# Altium footprint library WR-FPC_0.50mm.PcbLib: 147 footprints (part 8 of 10)
Each footprint in its own frame and in the unit in brackets; x right, y up, seen from the top. Pads: shape width x height; smd on the part's side, far side on the other; paste and mask are expansions set on the pad; w line width, h text height; cw(c..) or ccw(c..) is an arc to the next point about the centre after c.
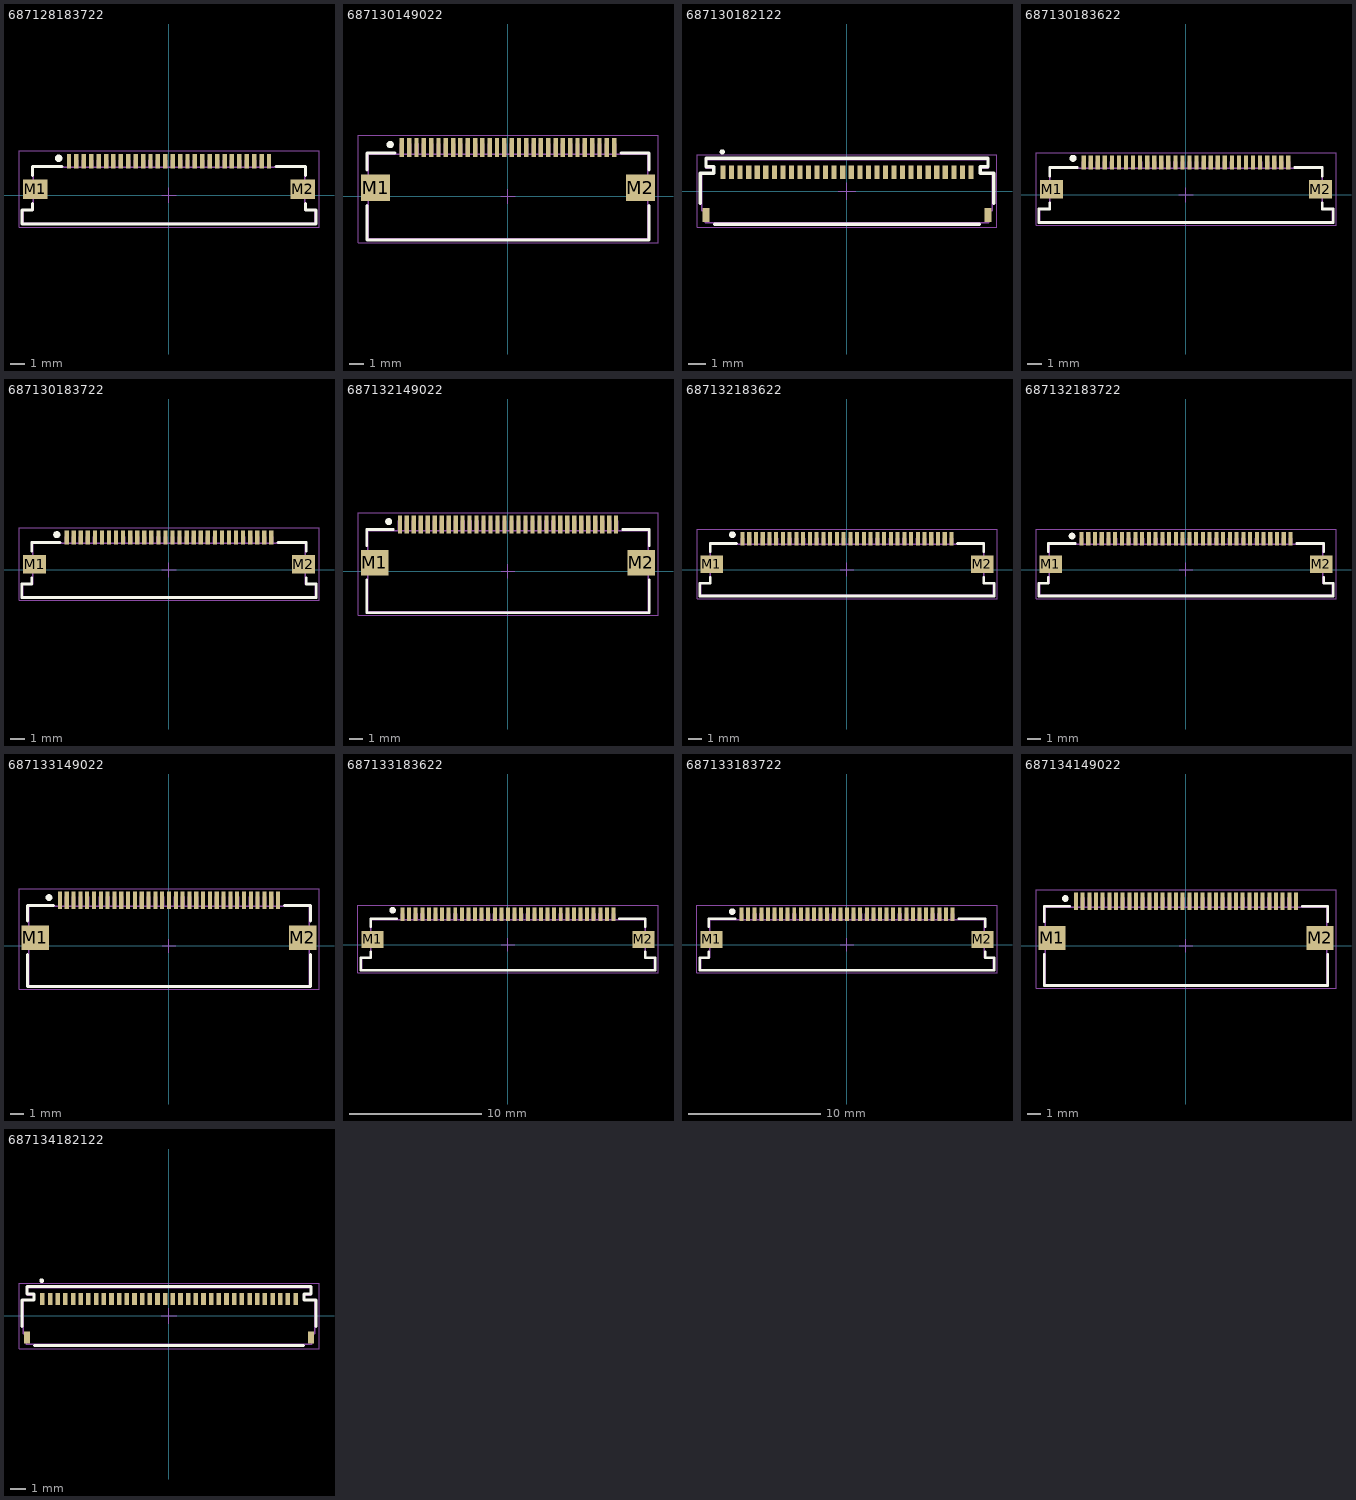
[diagram p7: the footprints below, top view; thin cyan lines are the x and y axes]

## 687128183722 [mm] "ZIF Connectors, Horizontal, Bottom Contact Low Profile, pitch 0.5mm, 28p"
height 1.3
pads (30):
  rect 0.3x1 smd: 1(-6.75,2.3) 2(-6.25,2.3) 3(-5.75,2.3) 4(-5.25,2.3) 5(-4.75,2.3) 6(-4.25,2.3) 7(-3.75,2.3) 8(-3.25,2.3) 9(-2.75,2.3) 10(-2.25,2.3) 11(-1.75,2.3) 12(-1.25,2.3) 13(-0.75,2.3) 14(-0.25,2.3) 15(0.25,2.3) 16(0.75,2.3) 17(1.25,2.3) 18(1.75,2.3) 19(2.25,2.3) 20(2.75,2.3) 21(3.25,2.3) 22(3.75,2.3) 23(4.25,2.3) 24(4.75,2.3) 25(5.25,2.3) 26(5.75,2.3) 27(6.25,2.3) 28(6.75,2.3)
  rect 1.65x1.3 smd: M1(-9.025,0.4) M2(9.025,0.4)
Top Overlay:
  circle w0.25: c-7.45,2.5 r0.125
  lines w0.2: -9.225,-0.55 -9.225,-1 -9.925,-1 -9.925,-1.95 9.925,-1.95 9.925,-1 9.225,-1 9.225,-0.55 ; -9.225,1.35 -9.225,1.95 -7.225,1.95 ; 7.225,1.95 9.225,1.95 9.225,1.35
Top Designator:
  text ".Designator" at -7.498,-0.5 h1.5
Top Component Outline:
  lines w0.1: -6.85,1.9 -6.85,2.35 -6.65,2.35 -6.65,1.9 ; -6.35,1.9 -6.35,2.35 -6.15,2.35 -6.15,1.9 ; -5.85,1.9 -5.85,2.35 -5.65,2.35 -5.65,1.9 ; -5.35,1.9 -5.35,2.35 -5.15,2.35 -5.15,1.9 ; -4.85,1.9 -4.85,2.35 -4.65,2.35 -4.65,1.9 ; -4.35,1.9 -4.35,2.35 -4.15,2.35 -4.15,1.9 ; -3.85,1.9 -3.85,2.35 -3.65,2.35 -3.65,1.9 ; -3.35,1.9 -3.35,2.35 -3.15,2.35 -3.15,1.9 ; -2.85,1.9 -2.85,2.35 -2.65,2.35 -2.65,1.9 ; -2.35,1.9 -2.35,2.35 -2.15,2.35 -2.15,1.9 ; -1.85,1.9 -1.85,2.35 -1.65,2.35 -1.65,1.9 ; -1.35,1.9 -1.35,2.35 -1.15,2.35 -1.15,1.9 ; -0.85,1.9 -0.85,2.35 -0.65,2.35 -0.65,1.9 ; -0.35,1.9 -0.35,2.35 -0.15,2.35 -0.15,1.9 ; 0.15,1.9 0.15,2.35 0.35,2.35 0.35,1.9 ; 0.65,1.9 0.65,2.35 0.85,2.35 0.85,1.9 ; 1.15,1.9 1.15,2.35 1.35,2.35 1.35,1.9 ; 1.65,1.9 1.65,2.35 1.85,2.35 1.85,1.9 ; 2.15,1.9 2.15,2.35 2.35,2.35 2.35,1.9 ; 2.65,1.9 2.65,2.35 2.85,2.35 2.85,1.9 ; 3.15,1.9 3.15,2.35 3.35,2.35 3.35,1.9 ; 3.65,1.9 3.65,2.35 3.85,2.35 3.85,1.9 ; 4.15,1.9 4.15,2.35 4.35,2.35 4.35,1.9 ; 4.65,1.9 4.65,2.35 4.85,2.35 4.85,1.9 ; 5.15,1.9 5.15,2.35 5.35,2.35 5.35,1.9 ; 5.65,1.9 5.65,2.35 5.85,2.35 5.85,1.9 ; 6.15,1.9 6.15,2.35 6.35,2.35 6.35,1.9 ; 6.65,1.9 6.65,2.35 6.85,2.35 6.85,1.9 ; -9.85,-1.9 9.85,-1.9 9.85,-1 9.15,-1 9.15,1.9 -9.15,1.9 -9.15,-1 -9.85,-1 -9.85,-1.9
Top 3D Body:
  lines w0.1: -6.85,1.9 -6.85,2.35 -6.65,2.35 -6.65,1.9 ; -6.35,1.9 -6.35,2.35 -6.15,2.35 -6.15,1.9 ; -5.85,1.9 -5.85,2.35 -5.65,2.35 -5.65,1.9 ; -5.35,1.9 -5.35,2.35 -5.15,2.35 -5.15,1.9 ; -4.85,1.9 -4.85,2.35 -4.65,2.35 -4.65,1.9 ; -4.35,1.9 -4.35,2.35 -4.15,2.35 -4.15,1.9 ; -3.85,1.9 -3.85,2.35 -3.65,2.35 -3.65,1.9 ; -3.35,1.9 -3.35,2.35 -3.15,2.35 -3.15,1.9 ; -2.85,1.9 -2.85,2.35 -2.65,2.35 -2.65,1.9 ; -2.35,1.9 -2.35,2.35 -2.15,2.35 -2.15,1.9 ; -1.85,1.9 -1.85,2.35 -1.65,2.35 -1.65,1.9 ; -1.35,1.9 -1.35,2.35 -1.15,2.35 -1.15,1.9 ; -0.85,1.9 -0.85,2.35 -0.65,2.35 -0.65,1.9 ; -0.35,1.9 -0.35,2.35 -0.15,2.35 -0.15,1.9 ; 0.15,1.9 0.15,2.35 0.35,2.35 0.35,1.9 ; 0.65,1.9 0.65,2.35 0.85,2.35 0.85,1.9 ; 1.15,1.9 1.15,2.35 1.35,2.35 1.35,1.9 ; 1.65,1.9 1.65,2.35 1.85,2.35 1.85,1.9 ; 2.15,1.9 2.15,2.35 2.35,2.35 2.35,1.9 ; 2.65,1.9 2.65,2.35 2.85,2.35 2.85,1.9 ; 3.15,1.9 3.15,2.35 3.35,2.35 3.35,1.9 ; 3.65,1.9 3.65,2.35 3.85,2.35 3.85,1.9 ; 4.15,1.9 4.15,2.35 4.35,2.35 4.35,1.9 ; 4.65,1.9 4.65,2.35 4.85,2.35 4.85,1.9 ; 5.15,1.9 5.15,2.35 5.35,2.35 5.35,1.9 ; 5.65,1.9 5.65,2.35 5.85,2.35 5.85,1.9 ; 6.15,1.9 6.15,2.35 6.35,2.35 6.35,1.9 ; 6.65,1.9 6.65,2.35 6.85,2.35 6.85,1.9 ; -9.85,-1.9 -9.85,-1 -9.15,-1 -9.15,1.9 9.15,1.9 9.15,-1 9.85,-1 9.85,-1.9 -9.85,-1.9
Top Courtyard:
  lines w0.05: -0.5,0 0.5,0 ; 0,-0.5 0,0.5 ; -10.125,-2.15 10.125,-2.15 10.125,3 -10.125,3 -10.125,-2.15
3D body "687128183722.stp": height 1.28, standoff -0.01, extent -9.85,-1.9 9.85,2.35

## 687130149022 [mm] "0.50mm SMT ZIF Horizontal Hinge Type Bottom Contact, 30p"
height 2.3
pads (32):
  rect 0.3x1.3 smd: 1(-7.25,3.35) 2(-6.75,3.35) 3(-6.25,3.35) 4(-5.75,3.35) 5(-5.25,3.35) 6(-4.75,3.35) 7(-4.25,3.35) 8(-3.75,3.35) 9(-3.25,3.35) 10(-2.75,3.35) 11(-2.25,3.35) 12(-1.75,3.35) 13(-1.25,3.35) 14(-0.75,3.35) 15(-0.25,3.35) 16(0.25,3.35) 17(0.75,3.35) 18(1.25,3.35) 19(1.75,3.35) 20(2.25,3.35) 21(2.75,3.35) 22(3.25,3.35) 23(3.75,3.35) 24(4.25,3.35) 25(4.75,3.35) 26(5.25,3.35) 27(5.75,3.35) 28(6.25,3.35) 29(6.75,3.35) 30(7.25,3.35)
  rect 2x1.8 smd: M1(-9.05,0.6) M2(9.05,0.6)
Top Overlay:
  circle w0.25: c-8.05,3.55 r0.125
  lines w0.2: -9.625,-0.625 -9.625,-2.975 9.625,-2.975 9.625,-0.625 ; -9.625,1.825 -9.625,2.975 -7.725,2.975 ; 7.725,2.975 9.625,2.975 9.625,1.825
Top Designator:
  text ".Designator" at -7.498,-0.5 h1.5
Top Component Outline:
  lines w0.1: -7.35,2.9 -7.35,3.6 -7.15,3.6 -7.15,2.9 ; -6.85,2.9 -6.85,3.6 -6.65,3.6 -6.65,2.9 ; -6.35,2.9 -6.35,3.6 -6.15,3.6 -6.15,2.9 ; -5.85,2.9 -5.85,3.6 -5.65,3.6 -5.65,2.9 ; -5.35,2.9 -5.35,3.6 -5.15,3.6 -5.15,2.9 ; -4.85,2.9 -4.85,3.6 -4.65,3.6 -4.65,2.9 ; -4.35,2.9 -4.35,3.6 -4.15,3.6 -4.15,2.9 ; -3.85,2.9 -3.85,3.6 -3.65,3.6 -3.65,2.9 ; -3.35,2.9 -3.35,3.6 -3.15,3.6 -3.15,2.9 ; -2.85,2.9 -2.85,3.6 -2.65,3.6 -2.65,2.9 ; -2.35,2.9 -2.35,3.6 -2.15,3.6 -2.15,2.9 ; -1.85,2.9 -1.85,3.6 -1.65,3.6 -1.65,2.9 ; -1.35,2.9 -1.35,3.6 -1.15,3.6 -1.15,2.9 ; -0.85,2.9 -0.85,3.6 -0.65,3.6 -0.65,2.9 ; -0.35,2.9 -0.35,3.6 -0.15,3.6 -0.15,2.9 ; 0.15,2.9 0.15,3.6 0.35,3.6 0.35,2.9 ; 0.65,2.9 0.65,3.6 0.85,3.6 0.85,2.9 ; 1.15,2.9 1.15,3.6 1.35,3.6 1.35,2.9 ; 1.65,2.9 1.65,3.6 1.85,3.6 1.85,2.9 ; 2.15,2.9 2.15,3.6 2.35,3.6 2.35,2.9 ; 2.65,2.9 2.65,3.6 2.85,3.6 2.85,2.9 ; 3.15,2.9 3.15,3.6 3.35,3.6 3.35,2.9 ; 3.65,2.9 3.65,3.6 3.85,3.6 3.85,2.9 ; 4.15,2.9 4.15,3.6 4.35,3.6 4.35,2.9 ; 4.65,2.9 4.65,3.6 4.85,3.6 4.85,2.9 ; 5.15,2.9 5.15,3.6 5.35,3.6 5.35,2.9 ; 5.65,2.9 5.65,3.6 5.85,3.6 5.85,2.9 ; 6.15,2.9 6.15,3.6 6.35,3.6 6.35,2.9 ; 6.65,2.9 6.65,3.6 6.85,3.6 6.85,2.9 ; 7.15,2.9 7.15,3.6 7.35,3.6 7.35,2.9 ; -9.55,-2.9 -9.55,2.9 9.55,2.9 9.55,-2.9 -9.55,-2.9
Top 3D Body:
  lines w0.1: -7.35,2.9 -7.35,3.6 -7.15,3.6 -7.15,2.9 ; -6.85,2.9 -6.85,3.6 -6.65,3.6 -6.65,2.9 ; -6.35,2.9 -6.35,3.6 -6.15,3.6 -6.15,2.9 ; -5.85,2.9 -5.85,3.6 -5.65,3.6 -5.65,2.9 ; -5.35,2.9 -5.35,3.6 -5.15,3.6 -5.15,2.9 ; -4.85,2.9 -4.85,3.6 -4.65,3.6 -4.65,2.9 ; -4.35,2.9 -4.35,3.6 -4.15,3.6 -4.15,2.9 ; -3.85,2.9 -3.85,3.6 -3.65,3.6 -3.65,2.9 ; -3.35,2.9 -3.35,3.6 -3.15,3.6 -3.15,2.9 ; -2.85,2.9 -2.85,3.6 -2.65,3.6 -2.65,2.9 ; -2.35,2.9 -2.35,3.6 -2.15,3.6 -2.15,2.9 ; -1.85,2.9 -1.85,3.6 -1.65,3.6 -1.65,2.9 ; -1.35,2.9 -1.35,3.6 -1.15,3.6 -1.15,2.9 ; -0.85,2.9 -0.85,3.6 -0.65,3.6 -0.65,2.9 ; -0.35,2.9 -0.35,3.6 -0.15,3.6 -0.15,2.9 ; 0.15,2.9 0.15,3.6 0.35,3.6 0.35,2.9 ; 0.65,2.9 0.65,3.6 0.85,3.6 0.85,2.9 ; 1.15,2.9 1.15,3.6 1.35,3.6 1.35,2.9 ; 1.65,2.9 1.65,3.6 1.85,3.6 1.85,2.9 ; 2.15,2.9 2.15,3.6 2.35,3.6 2.35,2.9 ; 2.65,2.9 2.65,3.6 2.85,3.6 2.85,2.9 ; 3.15,2.9 3.15,3.6 3.35,3.6 3.35,2.9 ; 3.65,2.9 3.65,3.6 3.85,3.6 3.85,2.9 ; 4.15,2.9 4.15,3.6 4.35,3.6 4.35,2.9 ; 4.65,2.9 4.65,3.6 4.85,3.6 4.85,2.9 ; 5.15,2.9 5.15,3.6 5.35,3.6 5.35,2.9 ; 5.65,2.9 5.65,3.6 5.85,3.6 5.85,2.9 ; 6.15,2.9 6.15,3.6 6.35,3.6 6.35,2.9 ; 6.65,2.9 6.65,3.6 6.85,3.6 6.85,2.9 ; 7.15,2.9 7.15,3.6 7.35,3.6 7.35,2.9 ; -9.55,-2.9 9.55,-2.9 9.55,2.9 -9.55,2.9 -9.55,-2.9
Top Courtyard:
  lines w0.05: -0.5,0 0.5,0 ; 0,-0.5 0,0.5 ; -10.25,-3.175 -10.25,4.2 10.25,4.2 10.25,-3.175 -10.25,-3.175
3D body "687130149022.stp": height 2.25, standoff 0, extent -9.55,-2.9 9.55,3.6

## 687130182122 [mm] "ZIF Connectors, Horizontal, Dual Contact Back Locking, pitch 0.5mm, 30p"
height 1.06
pads (32):
  rect 0.3x0.8 smd: 1(-7.25,1.1) 2(-6.75,1.1) 3(-6.25,1.1) 4(-5.75,1.1) 5(-5.25,1.1) 6(-4.75,1.1) 7(-4.25,1.1) 8(-3.75,1.1) 9(-3.25,1.1) 10(-2.75,1.1) 11(-2.25,1.1) 12(-1.75,1.1) 13(-1.25,1.1) 14(-0.75,1.1) 15(-0.25,1.1) 16(0.25,1.1) 17(0.75,1.1) 18(1.25,1.1) 19(1.75,1.1) 20(2.25,1.1) 21(2.75,1.1) 22(3.25,1.1) 23(3.75,1.1) 24(4.25,1.1) 25(4.75,1.1) 26(5.25,1.1) 27(5.75,1.1) 28(6.25,1.1) 29(6.75,1.1) 30(7.25,1.1)
  rect 0.4x0.8 smd: M1(-8.25,-1.4) M2(8.25,-1.4)
Top Overlay:
  circle w0.15: c-7.3,2.3 r0.075
  lines w0.2: -8.575,-0.7 -8.575,1.05 -7.8,1.05 -7.8,1.425 -8.25,1.425 -8.25,1.925 8.25,1.925 8.25,1.425 7.8,1.425 7.8,1.05 8.575,1.05 8.575,-0.7 ; -7.75,-1.925 7.75,-1.925
Top Designator:
  text ".Designator" at -7.498,-0.5 h1.5
Top Component Outline:
  lines w0.1: -8.5,-1.15 -8.5,1.05 -7.8,1.05 -7.8,1.35 -8.25,1.35 -8.25,1.85 8.25,1.85 8.25,1.35 7.8,1.35 7.8,1.05 8.5,1.05 8.5,-1.15 8.3,-1.15 8.3,-1.85 -8.3,-1.85 -8.3,-1.15 -8.5,-1.15
Top 3D Body:
  lines w0.1: -8.5,-1.15 -8.3,-1.15 -8.3,-1.85 8.3,-1.85 8.3,-1.15 8.5,-1.15 8.5,1.05 7.8,1.05 7.8,1.35 8.25,1.35 8.25,1.85 -8.25,1.85 -8.25,1.35 -7.8,1.35 -7.8,1.05 -8.5,1.05 -8.5,-1.15
Top Courtyard:
  lines w0.05: -0.5,0 0.5,0 ; 0,-0.5 0,0.5 ; -8.775,-2.125 -8.775,2.125 8.775,2.125 8.775,-2.125 -8.775,-2.125
3D body "687130182122.stp": height 0.98, standoff -0.01, extent -8.5,-1.85 8.5,1.85

## 687130183622 [mm] "ZIF Connectors, Horizontal, Top Contact Low Profile, pitch 0.5mm, 30p"
height 1.3
pads (32):
  rect 0.3x1 smd: 1(-7.25,2.3) 2(-6.75,2.3) 3(-6.25,2.3) 4(-5.75,2.3) 5(-5.25,2.3) 6(-4.75,2.3) 7(-4.25,2.3) 8(-3.75,2.3) 9(-3.25,2.3) 10(-2.75,2.3) 11(-2.25,2.3) 12(-1.75,2.3) 13(-1.25,2.3) 14(-0.75,2.3) 15(-0.25,2.3) 16(0.25,2.3) 17(0.75,2.3) 18(1.25,2.3) 19(1.75,2.3) 20(2.25,2.3) 21(2.75,2.3) 22(3.25,2.3) 23(3.75,2.3) 24(4.25,2.3) 25(4.75,2.3) 26(5.25,2.3) 27(5.75,2.3) 28(6.25,2.3) 29(6.75,2.3) 30(7.25,2.3)
  rect 1.65x1.3 smd: M1(-9.525,0.4) M2(9.525,0.4)
Top Overlay:
  circle w0.25: c-8,2.6 r0.125
  lines w0.2: -9.65,-0.55 -9.65,-1 -10.425,-1 -10.425,-1.95 10.425,-1.95 10.425,-1 9.65,-1 9.65,-0.55 ; -9.65,1.35 -9.65,1.95 -7.7,1.95 ; 7.7,1.95 9.65,1.95 9.65,1.35
Top Designator:
  text ".Designator" at -7.498,-0.5 h1.5
Top Component Outline:
  lines w0.1: -7.35,1.9 -7.35,2.35 -7.15,2.35 -7.15,1.9 ; -6.85,1.9 -6.85,2.35 -6.65,2.35 -6.65,1.9 ; -6.35,1.9 -6.35,2.35 -6.15,2.35 -6.15,1.9 ; -5.85,1.9 -5.85,2.35 -5.65,2.35 -5.65,1.9 ; -5.35,1.9 -5.35,2.35 -5.15,2.35 -5.15,1.9 ; -4.85,1.9 -4.85,2.35 -4.65,2.35 -4.65,1.9 ; -4.35,1.9 -4.35,2.35 -4.15,2.35 -4.15,1.9 ; -3.85,1.9 -3.85,2.35 -3.65,2.35 -3.65,1.9 ; -3.35,1.9 -3.35,2.35 -3.15,2.35 -3.15,1.9 ; -2.85,1.9 -2.85,2.35 -2.65,2.35 -2.65,1.9 ; -2.35,1.9 -2.35,2.35 -2.15,2.35 -2.15,1.9 ; -1.85,1.9 -1.85,2.35 -1.65,2.35 -1.65,1.9 ; -1.35,1.9 -1.35,2.35 -1.15,2.35 -1.15,1.9 ; -0.85,1.9 -0.85,2.35 -0.65,2.35 -0.65,1.9 ; -0.35,1.9 -0.35,2.35 -0.15,2.35 -0.15,1.9 ; 0.15,1.9 0.15,2.35 0.35,2.35 0.35,1.9 ; 0.65,1.9 0.65,2.35 0.85,2.35 0.85,1.9 ; 1.15,1.9 1.15,2.35 1.35,2.35 1.35,1.9 ; 1.65,1.9 1.65,2.35 1.85,2.35 1.85,1.9 ; 2.15,1.9 2.15,2.35 2.35,2.35 2.35,1.9 ; 2.65,1.9 2.65,2.35 2.85,2.35 2.85,1.9 ; 3.15,1.9 3.15,2.35 3.35,2.35 3.35,1.9 ; 3.65,1.9 3.65,2.35 3.85,2.35 3.85,1.9 ; 4.15,1.9 4.15,2.35 4.35,2.35 4.35,1.9 ; 4.65,1.9 4.65,2.35 4.85,2.35 4.85,1.9 ; 5.15,1.9 5.15,2.35 5.35,2.35 5.35,1.9 ; 5.65,1.9 5.65,2.35 5.85,2.35 5.85,1.9 ; 6.15,1.9 6.15,2.35 6.35,2.35 6.35,1.9 ; 6.65,1.9 6.65,2.35 6.85,2.35 6.85,1.9 ; 7.15,1.9 7.15,2.35 7.35,2.35 7.35,1.9 ; -10.35,-1.9 10.35,-1.9 10.35,-1 9.65,-1 9.65,1.9 -9.65,1.9 -9.65,-1 -10.35,-1 -10.35,-1.9
Top 3D Body:
  lines w0.1: -7.35,1.9 -7.35,2.35 -7.15,2.35 -7.15,1.9 ; -6.85,1.9 -6.85,2.35 -6.65,2.35 -6.65,1.9 ; -6.35,1.9 -6.35,2.35 -6.15,2.35 -6.15,1.9 ; -5.85,1.9 -5.85,2.35 -5.65,2.35 -5.65,1.9 ; -5.35,1.9 -5.35,2.35 -5.15,2.35 -5.15,1.9 ; -4.85,1.9 -4.85,2.35 -4.65,2.35 -4.65,1.9 ; -4.35,1.9 -4.35,2.35 -4.15,2.35 -4.15,1.9 ; -3.85,1.9 -3.85,2.35 -3.65,2.35 -3.65,1.9 ; -3.35,1.9 -3.35,2.35 -3.15,2.35 -3.15,1.9 ; -2.85,1.9 -2.85,2.35 -2.65,2.35 -2.65,1.9 ; -2.35,1.9 -2.35,2.35 -2.15,2.35 -2.15,1.9 ; -1.85,1.9 -1.85,2.35 -1.65,2.35 -1.65,1.9 ; -1.35,1.9 -1.35,2.35 -1.15,2.35 -1.15,1.9 ; -0.85,1.9 -0.85,2.35 -0.65,2.35 -0.65,1.9 ; -0.35,1.9 -0.35,2.35 -0.15,2.35 -0.15,1.9 ; 0.15,1.9 0.15,2.35 0.35,2.35 0.35,1.9 ; 0.65,1.9 0.65,2.35 0.85,2.35 0.85,1.9 ; 1.15,1.9 1.15,2.35 1.35,2.35 1.35,1.9 ; 1.65,1.9 1.65,2.35 1.85,2.35 1.85,1.9 ; 2.15,1.9 2.15,2.35 2.35,2.35 2.35,1.9 ; 2.65,1.9 2.65,2.35 2.85,2.35 2.85,1.9 ; 3.15,1.9 3.15,2.35 3.35,2.35 3.35,1.9 ; 3.65,1.9 3.65,2.35 3.85,2.35 3.85,1.9 ; 4.15,1.9 4.15,2.35 4.35,2.35 4.35,1.9 ; 4.65,1.9 4.65,2.35 4.85,2.35 4.85,1.9 ; 5.15,1.9 5.15,2.35 5.35,2.35 5.35,1.9 ; 5.65,1.9 5.65,2.35 5.85,2.35 5.85,1.9 ; 6.15,1.9 6.15,2.35 6.35,2.35 6.35,1.9 ; 6.65,1.9 6.65,2.35 6.85,2.35 6.85,1.9 ; 7.15,1.9 7.15,2.35 7.35,2.35 7.35,1.9 ; -10.35,-1.9 -10.35,-1 -9.65,-1 -9.65,1.9 9.65,1.9 9.65,-1 10.35,-1 10.35,-1.9 -10.35,-1.9
Top Courtyard:
  lines w0.05: -0.5,0 0.5,0 ; 0,-0.5 0,0.5 ; -10.625,-2.15 10.625,-2.15 10.625,3 -10.625,3 -10.625,-2.15
3D body "687130183622.stp": height 1.28, standoff -0.01, extent -10.35,-1.9 10.35,2.35

## 687130183722 [mm] "ZIF Connectors, Horizontal, Bottom Contact Low Profile, pitch 0.5mm, 30p"
height 1.3
pads (32):
  rect 0.3x1 smd: 1(-7.25,2.3) 2(-6.75,2.3) 3(-6.25,2.3) 4(-5.75,2.3) 5(-5.25,2.3) 6(-4.75,2.3) 7(-4.25,2.3) 8(-3.75,2.3) 9(-3.25,2.3) 10(-2.75,2.3) 11(-2.25,2.3) 12(-1.75,2.3) 13(-1.25,2.3) 14(-0.75,2.3) 15(-0.25,2.3) 16(0.25,2.3) 17(0.75,2.3) 18(1.25,2.3) 19(1.75,2.3) 20(2.25,2.3) 21(2.75,2.3) 22(3.25,2.3) 23(3.75,2.3) 24(4.25,2.3) 25(4.75,2.3) 26(5.25,2.3) 27(5.75,2.3) 28(6.25,2.3) 29(6.75,2.3) 30(7.25,2.3)
  rect 1.65x1.3 smd: M1(-9.525,0.4) M2(9.525,0.4)
Top Overlay:
  circle w0.25: c-7.95,2.5 r0.125
  lines w0.2: -9.725,-0.55 -9.725,-1 -10.425,-1 -10.425,-1.95 10.425,-1.95 10.425,-1 9.725,-1 9.725,-0.55 ; -9.725,1.35 -9.725,1.95 -7.725,1.95 ; 7.725,1.95 9.725,1.95 9.725,1.35
Top Designator:
  text ".Designator" at -7.498,-0.5 h1.5
Top Component Outline:
  lines w0.1: -7.35,1.9 -7.35,2.35 -7.15,2.35 -7.15,1.9 ; -6.85,1.9 -6.85,2.35 -6.65,2.35 -6.65,1.9 ; -6.35,1.9 -6.35,2.35 -6.15,2.35 -6.15,1.9 ; -5.85,1.9 -5.85,2.35 -5.65,2.35 -5.65,1.9 ; -5.35,1.9 -5.35,2.35 -5.15,2.35 -5.15,1.9 ; -4.85,1.9 -4.85,2.35 -4.65,2.35 -4.65,1.9 ; -4.35,1.9 -4.35,2.35 -4.15,2.35 -4.15,1.9 ; -3.85,1.9 -3.85,2.35 -3.65,2.35 -3.65,1.9 ; -3.35,1.9 -3.35,2.35 -3.15,2.35 -3.15,1.9 ; -2.85,1.9 -2.85,2.35 -2.65,2.35 -2.65,1.9 ; -2.35,1.9 -2.35,2.35 -2.15,2.35 -2.15,1.9 ; -1.85,1.9 -1.85,2.35 -1.65,2.35 -1.65,1.9 ; -1.35,1.9 -1.35,2.35 -1.15,2.35 -1.15,1.9 ; -0.85,1.9 -0.85,2.35 -0.65,2.35 -0.65,1.9 ; -0.35,1.9 -0.35,2.35 -0.15,2.35 -0.15,1.9 ; 0.15,1.9 0.15,2.35 0.35,2.35 0.35,1.9 ; 0.65,1.9 0.65,2.35 0.85,2.35 0.85,1.9 ; 1.15,1.9 1.15,2.35 1.35,2.35 1.35,1.9 ; 1.65,1.9 1.65,2.35 1.85,2.35 1.85,1.9 ; 2.15,1.9 2.15,2.35 2.35,2.35 2.35,1.9 ; 2.65,1.9 2.65,2.35 2.85,2.35 2.85,1.9 ; 3.15,1.9 3.15,2.35 3.35,2.35 3.35,1.9 ; 3.65,1.9 3.65,2.35 3.85,2.35 3.85,1.9 ; 4.15,1.9 4.15,2.35 4.35,2.35 4.35,1.9 ; 4.65,1.9 4.65,2.35 4.85,2.35 4.85,1.9 ; 5.15,1.9 5.15,2.35 5.35,2.35 5.35,1.9 ; 5.65,1.9 5.65,2.35 5.85,2.35 5.85,1.9 ; 6.15,1.9 6.15,2.35 6.35,2.35 6.35,1.9 ; 6.65,1.9 6.65,2.35 6.85,2.35 6.85,1.9 ; 7.15,1.9 7.15,2.35 7.35,2.35 7.35,1.9 ; -10.35,-1.9 10.35,-1.9 10.35,-1 9.65,-1 9.65,1.9 -9.65,1.9 -9.65,-1 -10.35,-1 -10.35,-1.9
Top 3D Body:
  lines w0.1: -7.35,1.9 -7.35,2.35 -7.15,2.35 -7.15,1.9 ; -6.85,1.9 -6.85,2.35 -6.65,2.35 -6.65,1.9 ; -6.35,1.9 -6.35,2.35 -6.15,2.35 -6.15,1.9 ; -5.85,1.9 -5.85,2.35 -5.65,2.35 -5.65,1.9 ; -5.35,1.9 -5.35,2.35 -5.15,2.35 -5.15,1.9 ; -4.85,1.9 -4.85,2.35 -4.65,2.35 -4.65,1.9 ; -4.35,1.9 -4.35,2.35 -4.15,2.35 -4.15,1.9 ; -3.85,1.9 -3.85,2.35 -3.65,2.35 -3.65,1.9 ; -3.35,1.9 -3.35,2.35 -3.15,2.35 -3.15,1.9 ; -2.85,1.9 -2.85,2.35 -2.65,2.35 -2.65,1.9 ; -2.35,1.9 -2.35,2.35 -2.15,2.35 -2.15,1.9 ; -1.85,1.9 -1.85,2.35 -1.65,2.35 -1.65,1.9 ; -1.35,1.9 -1.35,2.35 -1.15,2.35 -1.15,1.9 ; -0.85,1.9 -0.85,2.35 -0.65,2.35 -0.65,1.9 ; -0.35,1.9 -0.35,2.35 -0.15,2.35 -0.15,1.9 ; 0.15,1.9 0.15,2.35 0.35,2.35 0.35,1.9 ; 0.65,1.9 0.65,2.35 0.85,2.35 0.85,1.9 ; 1.15,1.9 1.15,2.35 1.35,2.35 1.35,1.9 ; 1.65,1.9 1.65,2.35 1.85,2.35 1.85,1.9 ; 2.15,1.9 2.15,2.35 2.35,2.35 2.35,1.9 ; 2.65,1.9 2.65,2.35 2.85,2.35 2.85,1.9 ; 3.15,1.9 3.15,2.35 3.35,2.35 3.35,1.9 ; 3.65,1.9 3.65,2.35 3.85,2.35 3.85,1.9 ; 4.15,1.9 4.15,2.35 4.35,2.35 4.35,1.9 ; 4.65,1.9 4.65,2.35 4.85,2.35 4.85,1.9 ; 5.15,1.9 5.15,2.35 5.35,2.35 5.35,1.9 ; 5.65,1.9 5.65,2.35 5.85,2.35 5.85,1.9 ; 6.15,1.9 6.15,2.35 6.35,2.35 6.35,1.9 ; 6.65,1.9 6.65,2.35 6.85,2.35 6.85,1.9 ; 7.15,1.9 7.15,2.35 7.35,2.35 7.35,1.9 ; -10.35,-1.9 -10.35,-1 -9.65,-1 -9.65,1.9 9.65,1.9 9.65,-1 10.35,-1 10.35,-1.9 -10.35,-1.9
Top Courtyard:
  lines w0.05: -0.5,0 0.5,0 ; 0,-0.5 0,0.5 ; -10.625,-2.15 10.625,-2.15 10.625,3 -10.625,3 -10.625,-2.15
3D body "687130183722.stp": height 1.28, standoff -0.01, extent -10.35,-1.9 10.35,2.35

## 687132149022 [mm] "0.50mm SMT ZIF Horizontal Hinge Type Bottom Contact, 32p"
height 2.3
pads (34):
  rect 0.3x1.3 smd: 1(-7.75,3.35) 2(-7.25,3.35) 3(-6.75,3.35) 4(-6.25,3.35) 5(-5.75,3.35) 6(-5.25,3.35) 7(-4.75,3.35) 8(-4.25,3.35) 9(-3.75,3.35) 10(-3.25,3.35) 11(-2.75,3.35) 12(-2.25,3.35) 13(-1.75,3.35) 14(-1.25,3.35) 15(-0.75,3.35) 16(-0.25,3.35) 17(0.25,3.35) 18(0.75,3.35) 19(1.25,3.35) 20(1.75,3.35) 21(2.25,3.35) 22(2.75,3.35) 23(3.25,3.35) 24(3.75,3.35) 25(4.25,3.35) 26(4.75,3.35) 27(5.25,3.35) 28(5.75,3.35) 29(6.25,3.35) 30(6.75,3.35) 31(7.25,3.35) 32(7.75,3.35)
  rect 2x1.8 smd: M1(-9.55,0.6) M2(9.55,0.6)
Top Overlay:
  circle w0.25: c-8.55,3.55 r0.125
  lines w0.2: -10.125,-0.625 -10.125,-2.975 10.125,-2.975 10.125,-0.625 ; -10.125,1.825 -10.125,2.975 -8.225,2.975 ; 8.225,2.975 10.125,2.975 10.125,1.825
Top Designator:
  text ".Designator" at -7.498,-0.5 h1.5
Top Component Outline:
  lines w0.1: -7.85,2.9 -7.85,3.6 -7.65,3.6 -7.65,2.9 ; -7.35,2.9 -7.35,3.6 -7.15,3.6 -7.15,2.9 ; -6.85,2.9 -6.85,3.6 -6.65,3.6 -6.65,2.9 ; -6.35,2.9 -6.35,3.6 -6.15,3.6 -6.15,2.9 ; -5.85,2.9 -5.85,3.6 -5.65,3.6 -5.65,2.9 ; -5.35,2.9 -5.35,3.6 -5.15,3.6 -5.15,2.9 ; -4.85,2.9 -4.85,3.6 -4.65,3.6 -4.65,2.9 ; -4.35,2.9 -4.35,3.6 -4.15,3.6 -4.15,2.9 ; -3.85,2.9 -3.85,3.6 -3.65,3.6 -3.65,2.9 ; -3.35,2.9 -3.35,3.6 -3.15,3.6 -3.15,2.9 ; -2.85,2.9 -2.85,3.6 -2.65,3.6 -2.65,2.9 ; -2.35,2.9 -2.35,3.6 -2.15,3.6 -2.15,2.9 ; -1.85,2.9 -1.85,3.6 -1.65,3.6 -1.65,2.9 ; -1.35,2.9 -1.35,3.6 -1.15,3.6 -1.15,2.9 ; -0.85,2.9 -0.85,3.6 -0.65,3.6 -0.65,2.9 ; -0.35,2.9 -0.35,3.6 -0.15,3.6 -0.15,2.9 ; 0.15,2.9 0.15,3.6 0.35,3.6 0.35,2.9 ; 0.65,2.9 0.65,3.6 0.85,3.6 0.85,2.9 ; 1.15,2.9 1.15,3.6 1.35,3.6 1.35,2.9 ; 1.65,2.9 1.65,3.6 1.85,3.6 1.85,2.9 ; 2.15,2.9 2.15,3.6 2.35,3.6 2.35,2.9 ; 2.65,2.9 2.65,3.6 2.85,3.6 2.85,2.9 ; 3.15,2.9 3.15,3.6 3.35,3.6 3.35,2.9 ; 3.65,2.9 3.65,3.6 3.85,3.6 3.85,2.9 ; 4.15,2.9 4.15,3.6 4.35,3.6 4.35,2.9 ; 4.65,2.9 4.65,3.6 4.85,3.6 4.85,2.9 ; 5.15,2.9 5.15,3.6 5.35,3.6 5.35,2.9 ; 5.65,2.9 5.65,3.6 5.85,3.6 5.85,2.9 ; 6.15,2.9 6.15,3.6 6.35,3.6 6.35,2.9 ; 6.65,2.9 6.65,3.6 6.85,3.6 6.85,2.9 ; 7.15,2.9 7.15,3.6 7.35,3.6 7.35,2.9 ; 7.65,2.9 7.65,3.6 7.85,3.6 7.85,2.9 ; -10.05,-2.9 -10.05,2.9 10.05,2.9 10.05,-2.9 -10.05,-2.9
Top 3D Body:
  lines w0.1: -7.85,2.9 -7.85,3.6 -7.65,3.6 -7.65,2.9 ; -7.35,2.9 -7.35,3.6 -7.15,3.6 -7.15,2.9 ; -6.85,2.9 -6.85,3.6 -6.65,3.6 -6.65,2.9 ; -6.35,2.9 -6.35,3.6 -6.15,3.6 -6.15,2.9 ; -5.85,2.9 -5.85,3.6 -5.65,3.6 -5.65,2.9 ; -5.35,2.9 -5.35,3.6 -5.15,3.6 -5.15,2.9 ; -4.85,2.9 -4.85,3.6 -4.65,3.6 -4.65,2.9 ; -4.35,2.9 -4.35,3.6 -4.15,3.6 -4.15,2.9 ; -3.85,2.9 -3.85,3.6 -3.65,3.6 -3.65,2.9 ; -3.35,2.9 -3.35,3.6 -3.15,3.6 -3.15,2.9 ; -2.85,2.9 -2.85,3.6 -2.65,3.6 -2.65,2.9 ; -2.35,2.9 -2.35,3.6 -2.15,3.6 -2.15,2.9 ; -1.85,2.9 -1.85,3.6 -1.65,3.6 -1.65,2.9 ; -1.35,2.9 -1.35,3.6 -1.15,3.6 -1.15,2.9 ; -0.85,2.9 -0.85,3.6 -0.65,3.6 -0.65,2.9 ; -0.35,2.9 -0.35,3.6 -0.15,3.6 -0.15,2.9 ; 0.15,2.9 0.15,3.6 0.35,3.6 0.35,2.9 ; 0.65,2.9 0.65,3.6 0.85,3.6 0.85,2.9 ; 1.15,2.9 1.15,3.6 1.35,3.6 1.35,2.9 ; 1.65,2.9 1.65,3.6 1.85,3.6 1.85,2.9 ; 2.15,2.9 2.15,3.6 2.35,3.6 2.35,2.9 ; 2.65,2.9 2.65,3.6 2.85,3.6 2.85,2.9 ; 3.15,2.9 3.15,3.6 3.35,3.6 3.35,2.9 ; 3.65,2.9 3.65,3.6 3.85,3.6 3.85,2.9 ; 4.15,2.9 4.15,3.6 4.35,3.6 4.35,2.9 ; 4.65,2.9 4.65,3.6 4.85,3.6 4.85,2.9 ; 5.15,2.9 5.15,3.6 5.35,3.6 5.35,2.9 ; 5.65,2.9 5.65,3.6 5.85,3.6 5.85,2.9 ; 6.15,2.9 6.15,3.6 6.35,3.6 6.35,2.9 ; 6.65,2.9 6.65,3.6 6.85,3.6 6.85,2.9 ; 7.15,2.9 7.15,3.6 7.35,3.6 7.35,2.9 ; 7.65,2.9 7.65,3.6 7.85,3.6 7.85,2.9 ; -10.05,-2.9 10.05,-2.9 10.05,2.9 -10.05,2.9 -10.05,-2.9
Top Courtyard:
  lines w0.05: -0.5,0 0.5,0 ; 0,-0.5 0,0.5 ; -10.75,-3.175 -10.75,4.2 10.75,4.2 10.75,-3.175 -10.75,-3.175
3D body "687132149022.stp": height 2.25, standoff 0, extent -10.05,-2.9 10.05,3.6

## 687132183622 [mm] "ZIF Connectors, Horizontal, Top Contact Low Profile, pitch 0.5mm, 32p"
height 1.3
pads (34):
  rect 0.3x1 smd: 1(-7.75,2.3) 2(-7.25,2.3) 3(-6.75,2.3) 4(-6.25,2.3) 5(-5.75,2.3) 6(-5.25,2.3) 7(-4.75,2.3) 8(-4.25,2.3) 9(-3.75,2.3) 10(-3.25,2.3) 11(-2.75,2.3) 12(-2.25,2.3) 13(-1.75,2.3) 14(-1.25,2.3) 15(-0.75,2.3) 16(-0.25,2.3) 17(0.25,2.3) 18(0.75,2.3) 19(1.25,2.3) 20(1.75,2.3) 21(2.25,2.3) 22(2.75,2.3) 23(3.25,2.3) 24(3.75,2.3) 25(4.25,2.3) 26(4.75,2.3) 27(5.25,2.3) 28(5.75,2.3) 29(6.25,2.3) 30(6.75,2.3) 31(7.25,2.3) 32(7.75,2.3)
  rect 1.65x1.3 smd: M1(-10.025,0.4) M2(10.025,0.4)
Top Overlay:
  circle w0.25: c-8.5,2.6 r0.125
  lines w0.2: -10.15,-0.55 -10.15,-1 -10.925,-1 -10.925,-1.95 10.925,-1.95 10.925,-1 10.15,-1 10.15,-0.55 ; -10.15,1.35 -10.15,1.95 -8.2,1.95 ; 8.2,1.95 10.15,1.95 10.15,1.35
Top Designator:
  text ".Designator" at -7.498,-0.5 h1.5
Top Component Outline:
  lines w0.1: -7.85,1.9 -7.85,2.35 -7.65,2.35 -7.65,1.9 ; -7.35,1.9 -7.35,2.35 -7.15,2.35 -7.15,1.9 ; -6.85,1.9 -6.85,2.35 -6.65,2.35 -6.65,1.9 ; -6.35,1.9 -6.35,2.35 -6.15,2.35 -6.15,1.9 ; -5.85,1.9 -5.85,2.35 -5.65,2.35 -5.65,1.9 ; -5.35,1.9 -5.35,2.35 -5.15,2.35 -5.15,1.9 ; -4.85,1.9 -4.85,2.35 -4.65,2.35 -4.65,1.9 ; -4.35,1.9 -4.35,2.35 -4.15,2.35 -4.15,1.9 ; -3.85,1.9 -3.85,2.35 -3.65,2.35 -3.65,1.9 ; -3.35,1.9 -3.35,2.35 -3.15,2.35 -3.15,1.9 ; -2.85,1.9 -2.85,2.35 -2.65,2.35 -2.65,1.9 ; -2.35,1.9 -2.35,2.35 -2.15,2.35 -2.15,1.9 ; -1.85,1.9 -1.85,2.35 -1.65,2.35 -1.65,1.9 ; -1.35,1.9 -1.35,2.35 -1.15,2.35 -1.15,1.9 ; -0.85,1.9 -0.85,2.35 -0.65,2.35 -0.65,1.9 ; -0.35,1.9 -0.35,2.35 -0.15,2.35 -0.15,1.9 ; 0.15,1.9 0.15,2.35 0.35,2.35 0.35,1.9 ; 0.65,1.9 0.65,2.35 0.85,2.35 0.85,1.9 ; 1.15,1.9 1.15,2.35 1.35,2.35 1.35,1.9 ; 1.65,1.9 1.65,2.35 1.85,2.35 1.85,1.9 ; 2.15,1.9 2.15,2.35 2.35,2.35 2.35,1.9 ; 2.65,1.9 2.65,2.35 2.85,2.35 2.85,1.9 ; 3.15,1.9 3.15,2.35 3.35,2.35 3.35,1.9 ; 3.65,1.9 3.65,2.35 3.85,2.35 3.85,1.9 ; 4.15,1.9 4.15,2.35 4.35,2.35 4.35,1.9 ; 4.65,1.9 4.65,2.35 4.85,2.35 4.85,1.9 ; 5.15,1.9 5.15,2.35 5.35,2.35 5.35,1.9 ; 5.65,1.9 5.65,2.35 5.85,2.35 5.85,1.9 ; 6.15,1.9 6.15,2.35 6.35,2.35 6.35,1.9 ; 6.65,1.9 6.65,2.35 6.85,2.35 6.85,1.9 ; 7.15,1.9 7.15,2.35 7.35,2.35 7.35,1.9 ; 7.65,1.9 7.65,2.35 7.85,2.35 7.85,1.9 ; -10.85,-1.9 -10.85,-1 -10.15,-1 -10.15,1.9 10.15,1.9 10.15,-1 10.85,-1 10.85,-1.9 -10.85,-1.9
Top 3D Body:
  lines w0.1: -7.85,1.9 -7.85,2.35 -7.65,2.35 -7.65,1.9 ; -7.35,1.9 -7.35,2.35 -7.15,2.35 -7.15,1.9 ; -6.85,1.9 -6.85,2.35 -6.65,2.35 -6.65,1.9 ; -6.35,1.9 -6.35,2.35 -6.15,2.35 -6.15,1.9 ; -5.85,1.9 -5.85,2.35 -5.65,2.35 -5.65,1.9 ; -5.35,1.9 -5.35,2.35 -5.15,2.35 -5.15,1.9 ; -4.85,1.9 -4.85,2.35 -4.65,2.35 -4.65,1.9 ; -4.35,1.9 -4.35,2.35 -4.15,2.35 -4.15,1.9 ; -3.85,1.9 -3.85,2.35 -3.65,2.35 -3.65,1.9 ; -3.35,1.9 -3.35,2.35 -3.15,2.35 -3.15,1.9 ; -2.85,1.9 -2.85,2.35 -2.65,2.35 -2.65,1.9 ; -2.35,1.9 -2.35,2.35 -2.15,2.35 -2.15,1.9 ; -1.85,1.9 -1.85,2.35 -1.65,2.35 -1.65,1.9 ; -1.35,1.9 -1.35,2.35 -1.15,2.35 -1.15,1.9 ; -0.85,1.9 -0.85,2.35 -0.65,2.35 -0.65,1.9 ; -0.35,1.9 -0.35,2.35 -0.15,2.35 -0.15,1.9 ; 0.15,1.9 0.15,2.35 0.35,2.35 0.35,1.9 ; 0.65,1.9 0.65,2.35 0.85,2.35 0.85,1.9 ; 1.15,1.9 1.15,2.35 1.35,2.35 1.35,1.9 ; 1.65,1.9 1.65,2.35 1.85,2.35 1.85,1.9 ; 2.15,1.9 2.15,2.35 2.35,2.35 2.35,1.9 ; 2.65,1.9 2.65,2.35 2.85,2.35 2.85,1.9 ; 3.15,1.9 3.15,2.35 3.35,2.35 3.35,1.9 ; 3.65,1.9 3.65,2.35 3.85,2.35 3.85,1.9 ; 4.15,1.9 4.15,2.35 4.35,2.35 4.35,1.9 ; 4.65,1.9 4.65,2.35 4.85,2.35 4.85,1.9 ; 5.15,1.9 5.15,2.35 5.35,2.35 5.35,1.9 ; 5.65,1.9 5.65,2.35 5.85,2.35 5.85,1.9 ; 6.15,1.9 6.15,2.35 6.35,2.35 6.35,1.9 ; 6.65,1.9 6.65,2.35 6.85,2.35 6.85,1.9 ; 7.15,1.9 7.15,2.35 7.35,2.35 7.35,1.9 ; 7.65,1.9 7.65,2.35 7.85,2.35 7.85,1.9 ; -10.85,-1.9 10.85,-1.9 10.85,-1 10.15,-1 10.15,1.9 -10.15,1.9 -10.15,-1 -10.85,-1 -10.85,-1.9
Top Courtyard:
  lines w0.05: -0.5,0 0.5,0 ; 0,-0.5 0,0.5 ; -11.125,-2.15 -11.125,3 11.125,3 11.125,-2.15 -11.125,-2.15
3D body "687132183622.stp": height 1.28, standoff -0.01, extent -10.85,-1.9 10.85,2.35

## 687132183722 [mm] "ZIF Connectors, Horizontal, Bottom Contact Low Profile, pitch 0.5mm, 32p"
height 1.3
pads (34):
  rect 0.3x1 smd: 1(-7.75,2.3) 2(-7.25,2.3) 3(-6.75,2.3) 4(-6.25,2.3) 5(-5.75,2.3) 6(-5.25,2.3) 7(-4.75,2.3) 8(-4.25,2.3) 9(-3.75,2.3) 10(-3.25,2.3) 11(-2.75,2.3) 12(-2.25,2.3) 13(-1.75,2.3) 14(-1.25,2.3) 15(-0.75,2.3) 16(-0.25,2.3) 17(0.25,2.3) 18(0.75,2.3) 19(1.25,2.3) 20(1.75,2.3) 21(2.25,2.3) 22(2.75,2.3) 23(3.25,2.3) 24(3.75,2.3) 25(4.25,2.3) 26(4.75,2.3) 27(5.25,2.3) 28(5.75,2.3) 29(6.25,2.3) 30(6.75,2.3) 31(7.25,2.3) 32(7.75,2.3)
  rect 1.65x1.3 smd: M1(-10.025,0.4) M2(10.025,0.4)
Top Overlay:
  circle w0.25: c-8.45,2.5 r0.125
  lines w0.2: -10.225,-0.55 -10.225,-1 -10.925,-1 -10.925,-1.95 10.925,-1.95 10.925,-1 10.225,-1 10.225,-0.55 ; -10.225,1.35 -10.225,1.95 -8.225,1.95 ; 8.225,1.95 10.225,1.95 10.225,1.35
Top Designator:
  text ".Designator" at -7.498,-0.5 h1.5
Top Component Outline:
  lines w0.1: -7.85,1.9 -7.85,2.35 -7.65,2.35 -7.65,1.9 ; -7.35,1.9 -7.35,2.35 -7.15,2.35 -7.15,1.9 ; -6.85,1.9 -6.85,2.35 -6.65,2.35 -6.65,1.9 ; -6.35,1.9 -6.35,2.35 -6.15,2.35 -6.15,1.9 ; -5.85,1.9 -5.85,2.35 -5.65,2.35 -5.65,1.9 ; -5.35,1.9 -5.35,2.35 -5.15,2.35 -5.15,1.9 ; -4.85,1.9 -4.85,2.35 -4.65,2.35 -4.65,1.9 ; -4.35,1.9 -4.35,2.35 -4.15,2.35 -4.15,1.9 ; -3.85,1.9 -3.85,2.35 -3.65,2.35 -3.65,1.9 ; -3.35,1.9 -3.35,2.35 -3.15,2.35 -3.15,1.9 ; -2.85,1.9 -2.85,2.35 -2.65,2.35 -2.65,1.9 ; -2.35,1.9 -2.35,2.35 -2.15,2.35 -2.15,1.9 ; -1.85,1.9 -1.85,2.35 -1.65,2.35 -1.65,1.9 ; -1.35,1.9 -1.35,2.35 -1.15,2.35 -1.15,1.9 ; -0.85,1.9 -0.85,2.35 -0.65,2.35 -0.65,1.9 ; -0.35,1.9 -0.35,2.35 -0.15,2.35 -0.15,1.9 ; 0.15,1.9 0.15,2.35 0.35,2.35 0.35,1.9 ; 0.65,1.9 0.65,2.35 0.85,2.35 0.85,1.9 ; 1.15,1.9 1.15,2.35 1.35,2.35 1.35,1.9 ; 1.65,1.9 1.65,2.35 1.85,2.35 1.85,1.9 ; 2.15,1.9 2.15,2.35 2.35,2.35 2.35,1.9 ; 2.65,1.9 2.65,2.35 2.85,2.35 2.85,1.9 ; 3.15,1.9 3.15,2.35 3.35,2.35 3.35,1.9 ; 3.65,1.9 3.65,2.35 3.85,2.35 3.85,1.9 ; 4.15,1.9 4.15,2.35 4.35,2.35 4.35,1.9 ; 4.65,1.9 4.65,2.35 4.85,2.35 4.85,1.9 ; 5.15,1.9 5.15,2.35 5.35,2.35 5.35,1.9 ; 5.65,1.9 5.65,2.35 5.85,2.35 5.85,1.9 ; 6.15,1.9 6.15,2.35 6.35,2.35 6.35,1.9 ; 6.65,1.9 6.65,2.35 6.85,2.35 6.85,1.9 ; 7.15,1.9 7.15,2.35 7.35,2.35 7.35,1.9 ; 7.65,1.9 7.65,2.35 7.85,2.35 7.85,1.9 ; -10.85,-1.9 -10.85,-1 -10.15,-1 -10.15,1.9 10.15,1.9 10.15,-1 10.85,-1 10.85,-1.9 -10.85,-1.9
Top 3D Body:
  lines w0.1: -7.85,1.9 -7.85,2.35 -7.65,2.35 -7.65,1.9 ; -7.35,1.9 -7.35,2.35 -7.15,2.35 -7.15,1.9 ; -6.85,1.9 -6.85,2.35 -6.65,2.35 -6.65,1.9 ; -6.35,1.9 -6.35,2.35 -6.15,2.35 -6.15,1.9 ; -5.85,1.9 -5.85,2.35 -5.65,2.35 -5.65,1.9 ; -5.35,1.9 -5.35,2.35 -5.15,2.35 -5.15,1.9 ; -4.85,1.9 -4.85,2.35 -4.65,2.35 -4.65,1.9 ; -4.35,1.9 -4.35,2.35 -4.15,2.35 -4.15,1.9 ; -3.85,1.9 -3.85,2.35 -3.65,2.35 -3.65,1.9 ; -3.35,1.9 -3.35,2.35 -3.15,2.35 -3.15,1.9 ; -2.85,1.9 -2.85,2.35 -2.65,2.35 -2.65,1.9 ; -2.35,1.9 -2.35,2.35 -2.15,2.35 -2.15,1.9 ; -1.85,1.9 -1.85,2.35 -1.65,2.35 -1.65,1.9 ; -1.35,1.9 -1.35,2.35 -1.15,2.35 -1.15,1.9 ; -0.85,1.9 -0.85,2.35 -0.65,2.35 -0.65,1.9 ; -0.35,1.9 -0.35,2.35 -0.15,2.35 -0.15,1.9 ; 0.15,1.9 0.15,2.35 0.35,2.35 0.35,1.9 ; 0.65,1.9 0.65,2.35 0.85,2.35 0.85,1.9 ; 1.15,1.9 1.15,2.35 1.35,2.35 1.35,1.9 ; 1.65,1.9 1.65,2.35 1.85,2.35 1.85,1.9 ; 2.15,1.9 2.15,2.35 2.35,2.35 2.35,1.9 ; 2.65,1.9 2.65,2.35 2.85,2.35 2.85,1.9 ; 3.15,1.9 3.15,2.35 3.35,2.35 3.35,1.9 ; 3.65,1.9 3.65,2.35 3.85,2.35 3.85,1.9 ; 4.15,1.9 4.15,2.35 4.35,2.35 4.35,1.9 ; 4.65,1.9 4.65,2.35 4.85,2.35 4.85,1.9 ; 5.15,1.9 5.15,2.35 5.35,2.35 5.35,1.9 ; 5.65,1.9 5.65,2.35 5.85,2.35 5.85,1.9 ; 6.15,1.9 6.15,2.35 6.35,2.35 6.35,1.9 ; 6.65,1.9 6.65,2.35 6.85,2.35 6.85,1.9 ; 7.15,1.9 7.15,2.35 7.35,2.35 7.35,1.9 ; 7.65,1.9 7.65,2.35 7.85,2.35 7.85,1.9 ; -10.85,-1.9 10.85,-1.9 10.85,-1 10.15,-1 10.15,1.9 -10.15,1.9 -10.15,-1 -10.85,-1 -10.85,-1.9
Top Courtyard:
  lines w0.05: -0.5,0 0.5,0 ; 0,-0.5 0,0.5 ; -11.125,-2.15 -11.125,3 11.125,3 11.125,-2.15 -11.125,-2.15
3D body "687132183722 (rev1).stp": height 1.28, standoff -0.01, extent -10.85,-1.9 10.85,2.35

## 687133149022 [mm] "0.50mm SMT ZIF Horizontal Hinge Type Bottom Contact, 33p"
height 2.3
pads (35):
  rect 0.3x1.3 smd: 1(-8,3.35) 2(-7.5,3.35) 3(-7,3.35) 4(-6.5,3.35) 5(-6,3.35) 6(-5.5,3.35) 7(-5,3.35) 8(-4.5,3.35) 9(-4,3.35) 10(-3.5,3.35) 11(-3,3.35) 12(-2.5,3.35) 13(-2,3.35) 14(-1.5,3.35) 15(-1,3.35) 16(-0.5,3.35) 17(0,3.35) 18(0.5,3.35) 19(1,3.35) 20(1.5,3.35) 21(2,3.35) 22(2.5,3.35) 23(3,3.35) 24(3.5,3.35) 25(4,3.35) 26(4.5,3.35) 27(5,3.35) 28(5.5,3.35) 29(6,3.35) 30(6.5,3.35) 31(7,3.35) 32(7.5,3.35) 33(8,3.35)
  rect 2x1.8 smd: M1(-9.8,0.6) M2(9.8,0.6)
Top Overlay:
  circle w0.25: c-8.8,3.55 r0.125
  lines w0.2: -10.375,-0.625 -10.375,-2.975 10.375,-2.975 10.375,-0.625 ; -10.375,1.825 -10.375,2.975 -8.475,2.975 ; 8.475,2.975 10.375,2.975 10.375,1.825
Top Designator:
  text ".Designator" at -7.498,-0.5 h1.5
Top Component Outline:
  lines w0.1: -8.1,2.9 -8.1,3.6 -7.9,3.6 -7.9,2.9 ; -7.6,2.9 -7.6,3.6 -7.4,3.6 -7.4,2.9 ; -7.1,2.9 -7.1,3.6 -6.9,3.6 -6.9,2.9 ; -6.6,2.9 -6.6,3.6 -6.4,3.6 -6.4,2.9 ; -6.1,2.9 -6.1,3.6 -5.9,3.6 -5.9,2.9 ; -5.6,2.9 -5.6,3.6 -5.4,3.6 -5.4,2.9 ; -5.1,2.9 -5.1,3.6 -4.9,3.6 -4.9,2.9 ; -4.6,2.9 -4.6,3.6 -4.4,3.6 -4.4,2.9 ; -4.1,2.9 -4.1,3.6 -3.9,3.6 -3.9,2.9 ; -3.6,2.9 -3.6,3.6 -3.4,3.6 -3.4,2.9 ; -3.1,2.9 -3.1,3.6 -2.9,3.6 -2.9,2.9 ; -2.6,2.9 -2.6,3.6 -2.4,3.6 -2.4,2.9 ; -2.1,2.9 -2.1,3.6 -1.9,3.6 -1.9,2.9 ; -1.6,2.9 -1.6,3.6 -1.4,3.6 -1.4,2.9 ; -1.1,2.9 -1.1,3.6 -0.9,3.6 -0.9,2.9 ; -0.6,2.9 -0.6,3.6 -0.4,3.6 -0.4,2.9 ; -0.1,2.9 -0.1,3.6 0.1,3.6 0.1,2.9 ; 0.4,2.9 0.4,3.6 0.6,3.6 0.6,2.9 ; 0.9,2.9 0.9,3.6 1.1,3.6 1.1,2.9 ; 1.4,2.9 1.4,3.6 1.6,3.6 1.6,2.9 ; 1.9,2.9 1.9,3.6 2.1,3.6 2.1,2.9 ; 2.4,2.9 2.4,3.6 2.6,3.6 2.6,2.9 ; 2.9,2.9 2.9,3.6 3.1,3.6 3.1,2.9 ; 3.4,2.9 3.4,3.6 3.6,3.6 3.6,2.9 ; 3.9,2.9 3.9,3.6 4.1,3.6 4.1,2.9 ; 4.4,2.9 4.4,3.6 4.6,3.6 4.6,2.9 ; 4.9,2.9 4.9,3.6 5.1,3.6 5.1,2.9 ; 5.4,2.9 5.4,3.6 5.6,3.6 5.6,2.9 ; 5.9,2.9 5.9,3.6 6.1,3.6 6.1,2.9 ; 6.4,2.9 6.4,3.6 6.6,3.6 6.6,2.9 ; 6.9,2.9 6.9,3.6 7.1,3.6 7.1,2.9 ; 7.4,2.9 7.4,3.6 7.6,3.6 7.6,2.9 ; 7.9,2.9 7.9,3.6 8.1,3.6 8.1,2.9 ; -10.3,-2.9 10.3,-2.9 10.3,2.9 -10.3,2.9 -10.3,-2.9
Top 3D Body:
  lines w0.1: -8.1,2.9 -8.1,3.6 -7.9,3.6 -7.9,2.9 ; -7.6,2.9 -7.6,3.6 -7.4,3.6 -7.4,2.9 ; -7.1,2.9 -7.1,3.6 -6.9,3.6 -6.9,2.9 ; -6.6,2.9 -6.6,3.6 -6.4,3.6 -6.4,2.9 ; -6.1,2.9 -6.1,3.6 -5.9,3.6 -5.9,2.9 ; -5.6,2.9 -5.6,3.6 -5.4,3.6 -5.4,2.9 ; -5.1,2.9 -5.1,3.6 -4.9,3.6 -4.9,2.9 ; -4.6,2.9 -4.6,3.6 -4.4,3.6 -4.4,2.9 ; -4.1,2.9 -4.1,3.6 -3.9,3.6 -3.9,2.9 ; -3.6,2.9 -3.6,3.6 -3.4,3.6 -3.4,2.9 ; -3.1,2.9 -3.1,3.6 -2.9,3.6 -2.9,2.9 ; -2.6,2.9 -2.6,3.6 -2.4,3.6 -2.4,2.9 ; -2.1,2.9 -2.1,3.6 -1.9,3.6 -1.9,2.9 ; -1.6,2.9 -1.6,3.6 -1.4,3.6 -1.4,2.9 ; -1.1,2.9 -1.1,3.6 -0.9,3.6 -0.9,2.9 ; -0.6,2.9 -0.6,3.6 -0.4,3.6 -0.4,2.9 ; -0.1,2.9 -0.1,3.6 0.1,3.6 0.1,2.9 ; 0.4,2.9 0.4,3.6 0.6,3.6 0.6,2.9 ; 0.9,2.9 0.9,3.6 1.1,3.6 1.1,2.9 ; 1.4,2.9 1.4,3.6 1.6,3.6 1.6,2.9 ; 1.9,2.9 1.9,3.6 2.1,3.6 2.1,2.9 ; 2.4,2.9 2.4,3.6 2.6,3.6 2.6,2.9 ; 2.9,2.9 2.9,3.6 3.1,3.6 3.1,2.9 ; 3.4,2.9 3.4,3.6 3.6,3.6 3.6,2.9 ; 3.9,2.9 3.9,3.6 4.1,3.6 4.1,2.9 ; 4.4,2.9 4.4,3.6 4.6,3.6 4.6,2.9 ; 4.9,2.9 4.9,3.6 5.1,3.6 5.1,2.9 ; 5.4,2.9 5.4,3.6 5.6,3.6 5.6,2.9 ; 5.9,2.9 5.9,3.6 6.1,3.6 6.1,2.9 ; 6.4,2.9 6.4,3.6 6.6,3.6 6.6,2.9 ; 6.9,2.9 6.9,3.6 7.1,3.6 7.1,2.9 ; 7.4,2.9 7.4,3.6 7.6,3.6 7.6,2.9 ; 7.9,2.9 7.9,3.6 8.1,3.6 8.1,2.9 ; -10.3,-2.9 -10.3,2.9 10.3,2.9 10.3,-2.9 -10.3,-2.9
Top Courtyard:
  lines w0.05: -0.5,0 0.5,0 ; 0,-0.5 0,0.5 ; -11,-3.175 11,-3.175 11,4.2 -11,4.2 -11,-3.175
3D body "687133149022.stp": height 2.25, standoff 0, extent -10.3,-2.9 10.3,3.6

## 687133183622 [mm] "ZIF Connectors, Horizontal, Top Contact Low Profile, pitch 0.5mm, 33p"
height 1.3
pads (35):
  rect 0.3x1 smd: 1(-8,2.3) 2(-7.5,2.3) 3(-7,2.3) 4(-6.5,2.3) 5(-6,2.3) 6(-5.5,2.3) 7(-5,2.3) 8(-4.5,2.3) 9(-4,2.3) 10(-3.5,2.3) 11(-3,2.3) 12(-2.5,2.3) 13(-2,2.3) 14(-1.5,2.3) 15(-1,2.3) 16(-0.5,2.3) 17(0,2.3) 18(0.5,2.3) 19(1,2.3) 20(1.5,2.3) 21(2,2.3) 22(2.5,2.3) 23(3,2.3) 24(3.5,2.3) 25(4,2.3) 26(4.5,2.3) 27(5,2.3) 28(5.5,2.3) 29(6,2.3) 30(6.5,2.3) 31(7,2.3) 32(7.5,2.3) 33(8,2.3)
  rect 1.65x1.3 smd: M1(-10.275,0.4) M2(10.275,0.4)
Top Overlay:
  circle w0.25: c-8.75,2.6 r0.125
  lines w0.2: -10.4,-0.55 -10.4,-1 -11.175,-1 -11.175,-1.95 11.175,-1.95 11.175,-1 10.4,-1 10.4,-0.55 ; -10.4,1.35 -10.4,1.95 -8.45,1.95 ; 8.45,1.95 10.4,1.95 10.4,1.35
Top Designator:
  text ".Designator" at -7.498,-0.5 h1.5
Top Component Outline:
  lines w0.1: -8.1,1.9 -8.1,2.35 -7.9,2.35 -7.9,1.9 ; -7.6,1.9 -7.6,2.35 -7.4,2.35 -7.4,1.9 ; -7.1,1.9 -7.1,2.35 -6.9,2.35 -6.9,1.9 ; -6.6,1.9 -6.6,2.35 -6.4,2.35 -6.4,1.9 ; -6.1,1.9 -6.1,2.35 -5.9,2.35 -5.9,1.9 ; -5.6,1.9 -5.6,2.35 -5.4,2.35 -5.4,1.9 ; -5.1,1.9 -5.1,2.35 -4.9,2.35 -4.9,1.9 ; -4.6,1.9 -4.6,2.35 -4.4,2.35 -4.4,1.9 ; -4.1,1.9 -4.1,2.35 -3.9,2.35 -3.9,1.9 ; -3.6,1.9 -3.6,2.35 -3.4,2.35 -3.4,1.9 ; -3.1,1.9 -3.1,2.35 -2.9,2.35 -2.9,1.9 ; -2.6,1.9 -2.6,2.35 -2.4,2.35 -2.4,1.9 ; -2.1,1.9 -2.1,2.35 -1.9,2.35 -1.9,1.9 ; -1.6,1.9 -1.6,2.35 -1.4,2.35 -1.4,1.9 ; -1.1,1.9 -1.1,2.35 -0.9,2.35 -0.9,1.9 ; -0.6,1.9 -0.6,2.35 -0.4,2.35 -0.4,1.9 ; -0.1,1.9 -0.1,2.35 0.1,2.35 0.1,1.9 ; 0.4,1.9 0.4,2.35 0.6,2.35 0.6,1.9 ; 0.9,1.9 0.9,2.35 1.1,2.35 1.1,1.9 ; 1.4,1.9 1.4,2.35 1.6,2.35 1.6,1.9 ; 1.9,1.9 1.9,2.35 2.1,2.35 2.1,1.9 ; 2.4,1.9 2.4,2.35 2.6,2.35 2.6,1.9 ; 2.9,1.9 2.9,2.35 3.1,2.35 3.1,1.9 ; 3.4,1.9 3.4,2.35 3.6,2.35 3.6,1.9 ; 3.9,1.9 3.9,2.35 4.1,2.35 4.1,1.9 ; 4.4,1.9 4.4,2.35 4.6,2.35 4.6,1.9 ; 4.9,1.9 4.9,2.35 5.1,2.35 5.1,1.9 ; 5.4,1.9 5.4,2.35 5.6,2.35 5.6,1.9 ; 5.9,1.9 5.9,2.35 6.1,2.35 6.1,1.9 ; 6.4,1.9 6.4,2.35 6.6,2.35 6.6,1.9 ; 6.9,1.9 6.9,2.35 7.1,2.35 7.1,1.9 ; 7.4,1.9 7.4,2.35 7.6,2.35 7.6,1.9 ; 7.9,1.9 7.9,2.35 8.1,2.35 8.1,1.9 ; -11.1,-1.9 -11.1,-1 -10.4,-1 -10.4,1.9 10.4,1.9 10.4,-1 11.1,-1 11.1,-1.9 -11.1,-1.9
Top 3D Body:
  lines w0.1: -8.1,1.9 -8.1,2.35 -7.9,2.35 -7.9,1.9 ; -7.6,1.9 -7.6,2.35 -7.4,2.35 -7.4,1.9 ; -7.1,1.9 -7.1,2.35 -6.9,2.35 -6.9,1.9 ; -6.6,1.9 -6.6,2.35 -6.4,2.35 -6.4,1.9 ; -6.1,1.9 -6.1,2.35 -5.9,2.35 -5.9,1.9 ; -5.6,1.9 -5.6,2.35 -5.4,2.35 -5.4,1.9 ; -5.1,1.9 -5.1,2.35 -4.9,2.35 -4.9,1.9 ; -4.6,1.9 -4.6,2.35 -4.4,2.35 -4.4,1.9 ; -4.1,1.9 -4.1,2.35 -3.9,2.35 -3.9,1.9 ; -3.6,1.9 -3.6,2.35 -3.4,2.35 -3.4,1.9 ; -3.1,1.9 -3.1,2.35 -2.9,2.35 -2.9,1.9 ; -2.6,1.9 -2.6,2.35 -2.4,2.35 -2.4,1.9 ; -2.1,1.9 -2.1,2.35 -1.9,2.35 -1.9,1.9 ; -1.6,1.9 -1.6,2.35 -1.4,2.35 -1.4,1.9 ; -1.1,1.9 -1.1,2.35 -0.9,2.35 -0.9,1.9 ; -0.6,1.9 -0.6,2.35 -0.4,2.35 -0.4,1.9 ; -0.1,1.9 -0.1,2.35 0.1,2.35 0.1,1.9 ; 0.4,1.9 0.4,2.35 0.6,2.35 0.6,1.9 ; 0.9,1.9 0.9,2.35 1.1,2.35 1.1,1.9 ; 1.4,1.9 1.4,2.35 1.6,2.35 1.6,1.9 ; 1.9,1.9 1.9,2.35 2.1,2.35 2.1,1.9 ; 2.4,1.9 2.4,2.35 2.6,2.35 2.6,1.9 ; 2.9,1.9 2.9,2.35 3.1,2.35 3.1,1.9 ; 3.4,1.9 3.4,2.35 3.6,2.35 3.6,1.9 ; 3.9,1.9 3.9,2.35 4.1,2.35 4.1,1.9 ; 4.4,1.9 4.4,2.35 4.6,2.35 4.6,1.9 ; 4.9,1.9 4.9,2.35 5.1,2.35 5.1,1.9 ; 5.4,1.9 5.4,2.35 5.6,2.35 5.6,1.9 ; 5.9,1.9 5.9,2.35 6.1,2.35 6.1,1.9 ; 6.4,1.9 6.4,2.35 6.6,2.35 6.6,1.9 ; 6.9,1.9 6.9,2.35 7.1,2.35 7.1,1.9 ; 7.4,1.9 7.4,2.35 7.6,2.35 7.6,1.9 ; 7.9,1.9 7.9,2.35 8.1,2.35 8.1,1.9 ; -11.1,-1.9 11.1,-1.9 11.1,-1 10.4,-1 10.4,1.9 -10.4,1.9 -10.4,-1 -11.1,-1 -11.1,-1.9
Top Courtyard:
  lines w0.05: -0.5,0 0.5,0 ; 0,-0.5 0,0.5 ; -11.375,-2.15 -11.375,3 11.375,3 11.375,-2.15 -11.375,-2.15
3D body "687133183622.stp": height 1.28, standoff -0.01, extent -11.1,-1.9 11.1,2.35

## 687133183722 [mm] "ZIF Connectors, Horizontal, Bottom Contact Low Profile, pitch 0.5mm, 33p"
height 1.3
pads (35):
  rect 0.3x1 smd: 1(-8,2.3) 2(-7.5,2.3) 3(-7,2.3) 4(-6.5,2.3) 5(-6,2.3) 6(-5.5,2.3) 7(-5,2.3) 8(-4.5,2.3) 9(-4,2.3) 10(-3.5,2.3) 11(-3,2.3) 12(-2.5,2.3) 13(-2,2.3) 14(-1.5,2.3) 15(-1,2.3) 16(-0.5,2.3) 17(0,2.3) 18(0.5,2.3) 19(1,2.3) 20(1.5,2.3) 21(2,2.3) 22(2.5,2.3) 23(3,2.3) 24(3.5,2.3) 25(4,2.3) 26(4.5,2.3) 27(5,2.3) 28(5.5,2.3) 29(6,2.3) 30(6.5,2.3) 31(7,2.3) 32(7.5,2.3) 33(8,2.3)
  rect 1.65x1.3 smd: M1(-10.275,0.4) M2(10.275,0.4)
Top Overlay:
  circle w0.25: c-8.7,2.5 r0.125
  lines w0.2: -10.475,-0.55 -10.475,-1 -11.175,-1 -11.175,-1.95 11.175,-1.95 11.175,-1 10.475,-1 10.475,-0.55 ; -10.475,1.35 -10.475,1.95 -8.475,1.95 ; 8.475,1.95 10.475,1.95 10.475,1.35
Top Designator:
  text ".Designator" at -7.498,-0.5 h1.5
Top Component Outline:
  lines w0.1: -8.1,1.9 -8.1,2.35 -7.9,2.35 -7.9,1.9 ; -7.6,1.9 -7.6,2.35 -7.4,2.35 -7.4,1.9 ; -7.1,1.9 -7.1,2.35 -6.9,2.35 -6.9,1.9 ; -6.6,1.9 -6.6,2.35 -6.4,2.35 -6.4,1.9 ; -6.1,1.9 -6.1,2.35 -5.9,2.35 -5.9,1.9 ; -5.6,1.9 -5.6,2.35 -5.4,2.35 -5.4,1.9 ; -5.1,1.9 -5.1,2.35 -4.9,2.35 -4.9,1.9 ; -4.6,1.9 -4.6,2.35 -4.4,2.35 -4.4,1.9 ; -4.1,1.9 -4.1,2.35 -3.9,2.35 -3.9,1.9 ; -3.6,1.9 -3.6,2.35 -3.4,2.35 -3.4,1.9 ; -3.1,1.9 -3.1,2.35 -2.9,2.35 -2.9,1.9 ; -2.6,1.9 -2.6,2.35 -2.4,2.35 -2.4,1.9 ; -2.1,1.9 -2.1,2.35 -1.9,2.35 -1.9,1.9 ; -1.6,1.9 -1.6,2.35 -1.4,2.35 -1.4,1.9 ; -1.1,1.9 -1.1,2.35 -0.9,2.35 -0.9,1.9 ; -0.6,1.9 -0.6,2.35 -0.4,2.35 -0.4,1.9 ; -0.1,1.9 -0.1,2.35 0.1,2.35 0.1,1.9 ; 0.4,1.9 0.4,2.35 0.6,2.35 0.6,1.9 ; 0.9,1.9 0.9,2.35 1.1,2.35 1.1,1.9 ; 1.4,1.9 1.4,2.35 1.6,2.35 1.6,1.9 ; 1.9,1.9 1.9,2.35 2.1,2.35 2.1,1.9 ; 2.4,1.9 2.4,2.35 2.6,2.35 2.6,1.9 ; 2.9,1.9 2.9,2.35 3.1,2.35 3.1,1.9 ; 3.4,1.9 3.4,2.35 3.6,2.35 3.6,1.9 ; 3.9,1.9 3.9,2.35 4.1,2.35 4.1,1.9 ; 4.4,1.9 4.4,2.35 4.6,2.35 4.6,1.9 ; 4.9,1.9 4.9,2.35 5.1,2.35 5.1,1.9 ; 5.4,1.9 5.4,2.35 5.6,2.35 5.6,1.9 ; 5.9,1.9 5.9,2.35 6.1,2.35 6.1,1.9 ; 6.4,1.9 6.4,2.35 6.6,2.35 6.6,1.9 ; 6.9,1.9 6.9,2.35 7.1,2.35 7.1,1.9 ; 7.4,1.9 7.4,2.35 7.6,2.35 7.6,1.9 ; 7.9,1.9 7.9,2.35 8.1,2.35 8.1,1.9 ; -11.1,-1.9 11.1,-1.9 11.1,-1 10.4,-1 10.4,1.9 -10.4,1.9 -10.4,-1 -11.1,-1 -11.1,-1.9
Top 3D Body:
  lines w0.1: -8.1,1.9 -8.1,2.35 -7.9,2.35 -7.9,1.9 ; -7.6,1.9 -7.6,2.35 -7.4,2.35 -7.4,1.9 ; -7.1,1.9 -7.1,2.35 -6.9,2.35 -6.9,1.9 ; -6.6,1.9 -6.6,2.35 -6.4,2.35 -6.4,1.9 ; -6.1,1.9 -6.1,2.35 -5.9,2.35 -5.9,1.9 ; -5.6,1.9 -5.6,2.35 -5.4,2.35 -5.4,1.9 ; -5.1,1.9 -5.1,2.35 -4.9,2.35 -4.9,1.9 ; -4.6,1.9 -4.6,2.35 -4.4,2.35 -4.4,1.9 ; -4.1,1.9 -4.1,2.35 -3.9,2.35 -3.9,1.9 ; -3.6,1.9 -3.6,2.35 -3.4,2.35 -3.4,1.9 ; -3.1,1.9 -3.1,2.35 -2.9,2.35 -2.9,1.9 ; -2.6,1.9 -2.6,2.35 -2.4,2.35 -2.4,1.9 ; -2.1,1.9 -2.1,2.35 -1.9,2.35 -1.9,1.9 ; -1.6,1.9 -1.6,2.35 -1.4,2.35 -1.4,1.9 ; -1.1,1.9 -1.1,2.35 -0.9,2.35 -0.9,1.9 ; -0.6,1.9 -0.6,2.35 -0.4,2.35 -0.4,1.9 ; -0.1,1.9 -0.1,2.35 0.1,2.35 0.1,1.9 ; 0.4,1.9 0.4,2.35 0.6,2.35 0.6,1.9 ; 0.9,1.9 0.9,2.35 1.1,2.35 1.1,1.9 ; 1.4,1.9 1.4,2.35 1.6,2.35 1.6,1.9 ; 1.9,1.9 1.9,2.35 2.1,2.35 2.1,1.9 ; 2.4,1.9 2.4,2.35 2.6,2.35 2.6,1.9 ; 2.9,1.9 2.9,2.35 3.1,2.35 3.1,1.9 ; 3.4,1.9 3.4,2.35 3.6,2.35 3.6,1.9 ; 3.9,1.9 3.9,2.35 4.1,2.35 4.1,1.9 ; 4.4,1.9 4.4,2.35 4.6,2.35 4.6,1.9 ; 4.9,1.9 4.9,2.35 5.1,2.35 5.1,1.9 ; 5.4,1.9 5.4,2.35 5.6,2.35 5.6,1.9 ; 5.9,1.9 5.9,2.35 6.1,2.35 6.1,1.9 ; 6.4,1.9 6.4,2.35 6.6,2.35 6.6,1.9 ; 6.9,1.9 6.9,2.35 7.1,2.35 7.1,1.9 ; 7.4,1.9 7.4,2.35 7.6,2.35 7.6,1.9 ; 7.9,1.9 7.9,2.35 8.1,2.35 8.1,1.9 ; -11.1,-1.9 -11.1,-1 -10.4,-1 -10.4,1.9 10.4,1.9 10.4,-1 11.1,-1 11.1,-1.9 -11.1,-1.9
Top Courtyard:
  lines w0.05: -0.5,0 0.5,0 ; 0,-0.5 0,0.5 ; -11.375,-2.15 11.375,-2.15 11.375,3 -11.375,3 -11.375,-2.15
3D body "687133183722.stp": height 1.28, standoff -0.01, extent -11.1,-1.9 11.1,2.35

## 687134149022 [mm] "0.50mm SMT ZIF Horizontal Hinge Type Bottom Contact, 34p"
height 2.3
pads (36):
  rect 0.3x1.3 smd: 1(-8.25,3.35) 2(-7.75,3.35) 3(-7.25,3.35) 4(-6.75,3.35) 5(-6.25,3.35) 6(-5.75,3.35) 7(-5.25,3.35) 8(-4.75,3.35) 9(-4.25,3.35) 10(-3.75,3.35) 11(-3.25,3.35) 12(-2.75,3.35) 13(-2.25,3.35) 14(-1.75,3.35) 15(-1.25,3.35) 16(-0.75,3.35) 17(-0.25,3.35) 18(0.25,3.35) 19(0.75,3.35) 20(1.25,3.35) 21(1.75,3.35) 22(2.25,3.35) 23(2.75,3.35) 24(3.25,3.35) 25(3.75,3.35) 26(4.25,3.35) 27(4.75,3.35) 28(5.25,3.35) 29(5.75,3.35) 30(6.25,3.35) 31(6.75,3.35) 32(7.25,3.35) 33(7.75,3.35) 34(8.25,3.35)
  rect 2x1.8 smd: M1(-10.05,0.6) M2(10.05,0.6)
Top Overlay:
  circle w0.25: c-9.05,3.55 r0.125
  lines w0.2: -10.625,-0.625 -10.625,-2.975 10.625,-2.975 10.625,-0.625 ; -10.625,1.825 -10.625,2.975 -8.725,2.975 ; 8.725,2.975 10.625,2.975 10.625,1.825
Top Designator:
  text ".Designator" at -7.498,-0.5 h1.5
Top Component Outline:
  lines w0.1: -8.35,2.9 -8.35,3.6 -8.15,3.6 -8.15,2.9 ; -7.85,2.9 -7.85,3.6 -7.65,3.6 -7.65,2.9 ; -7.35,2.9 -7.35,3.6 -7.15,3.6 -7.15,2.9 ; -6.85,2.9 -6.85,3.6 -6.65,3.6 -6.65,2.9 ; -6.35,2.9 -6.35,3.6 -6.15,3.6 -6.15,2.9 ; -5.85,2.9 -5.85,3.6 -5.65,3.6 -5.65,2.9 ; -5.35,2.9 -5.35,3.6 -5.15,3.6 -5.15,2.9 ; -4.85,2.9 -4.85,3.6 -4.65,3.6 -4.65,2.9 ; -4.35,2.9 -4.35,3.6 -4.15,3.6 -4.15,2.9 ; -3.85,2.9 -3.85,3.6 -3.65,3.6 -3.65,2.9 ; -3.35,2.9 -3.35,3.6 -3.15,3.6 -3.15,2.9 ; -2.85,2.9 -2.85,3.6 -2.65,3.6 -2.65,2.9 ; -2.35,2.9 -2.35,3.6 -2.15,3.6 -2.15,2.9 ; -1.85,2.9 -1.85,3.6 -1.65,3.6 -1.65,2.9 ; -1.35,2.9 -1.35,3.6 -1.15,3.6 -1.15,2.9 ; -0.85,2.9 -0.85,3.6 -0.65,3.6 -0.65,2.9 ; -0.35,2.9 -0.35,3.6 -0.15,3.6 -0.15,2.9 ; 0.15,2.9 0.15,3.6 0.35,3.6 0.35,2.9 ; 0.65,2.9 0.65,3.6 0.85,3.6 0.85,2.9 ; 1.15,2.9 1.15,3.6 1.35,3.6 1.35,2.9 ; 1.65,2.9 1.65,3.6 1.85,3.6 1.85,2.9 ; 2.15,2.9 2.15,3.6 2.35,3.6 2.35,2.9 ; 2.65,2.9 2.65,3.6 2.85,3.6 2.85,2.9 ; 3.15,2.9 3.15,3.6 3.35,3.6 3.35,2.9 ; 3.65,2.9 3.65,3.6 3.85,3.6 3.85,2.9 ; 4.15,2.9 4.15,3.6 4.35,3.6 4.35,2.9 ; 4.65,2.9 4.65,3.6 4.85,3.6 4.85,2.9 ; 5.15,2.9 5.15,3.6 5.35,3.6 5.35,2.9 ; 5.65,2.9 5.65,3.6 5.85,3.6 5.85,2.9 ; 6.15,2.9 6.15,3.6 6.35,3.6 6.35,2.9 ; 6.65,2.9 6.65,3.6 6.85,3.6 6.85,2.9 ; 7.15,2.9 7.15,3.6 7.35,3.6 7.35,2.9 ; 7.65,2.9 7.65,3.6 7.85,3.6 7.85,2.9 ; 8.15,2.9 8.15,3.6 8.35,3.6 8.35,2.9 ; -10.55,-2.9 10.55,-2.9 10.55,2.9 -10.55,2.9 -10.55,-2.9
Top 3D Body:
  lines w0.1: -8.35,2.9 -8.35,3.6 -8.15,3.6 -8.15,2.9 ; -7.85,2.9 -7.85,3.6 -7.65,3.6 -7.65,2.9 ; -7.35,2.9 -7.35,3.6 -7.15,3.6 -7.15,2.9 ; -6.85,2.9 -6.85,3.6 -6.65,3.6 -6.65,2.9 ; -6.35,2.9 -6.35,3.6 -6.15,3.6 -6.15,2.9 ; -5.85,2.9 -5.85,3.6 -5.65,3.6 -5.65,2.9 ; -5.35,2.9 -5.35,3.6 -5.15,3.6 -5.15,2.9 ; -4.85,2.9 -4.85,3.6 -4.65,3.6 -4.65,2.9 ; -4.35,2.9 -4.35,3.6 -4.15,3.6 -4.15,2.9 ; -3.85,2.9 -3.85,3.6 -3.65,3.6 -3.65,2.9 ; -3.35,2.9 -3.35,3.6 -3.15,3.6 -3.15,2.9 ; -2.85,2.9 -2.85,3.6 -2.65,3.6 -2.65,2.9 ; -2.35,2.9 -2.35,3.6 -2.15,3.6 -2.15,2.9 ; -1.85,2.9 -1.85,3.6 -1.65,3.6 -1.65,2.9 ; -1.35,2.9 -1.35,3.6 -1.15,3.6 -1.15,2.9 ; -0.85,2.9 -0.85,3.6 -0.65,3.6 -0.65,2.9 ; -0.35,2.9 -0.35,3.6 -0.15,3.6 -0.15,2.9 ; 0.15,2.9 0.15,3.6 0.35,3.6 0.35,2.9 ; 0.65,2.9 0.65,3.6 0.85,3.6 0.85,2.9 ; 1.15,2.9 1.15,3.6 1.35,3.6 1.35,2.9 ; 1.65,2.9 1.65,3.6 1.85,3.6 1.85,2.9 ; 2.15,2.9 2.15,3.6 2.35,3.6 2.35,2.9 ; 2.65,2.9 2.65,3.6 2.85,3.6 2.85,2.9 ; 3.15,2.9 3.15,3.6 3.35,3.6 3.35,2.9 ; 3.65,2.9 3.65,3.6 3.85,3.6 3.85,2.9 ; 4.15,2.9 4.15,3.6 4.35,3.6 4.35,2.9 ; 4.65,2.9 4.65,3.6 4.85,3.6 4.85,2.9 ; 5.15,2.9 5.15,3.6 5.35,3.6 5.35,2.9 ; 5.65,2.9 5.65,3.6 5.85,3.6 5.85,2.9 ; 6.15,2.9 6.15,3.6 6.35,3.6 6.35,2.9 ; 6.65,2.9 6.65,3.6 6.85,3.6 6.85,2.9 ; 7.15,2.9 7.15,3.6 7.35,3.6 7.35,2.9 ; 7.65,2.9 7.65,3.6 7.85,3.6 7.85,2.9 ; 8.15,2.9 8.15,3.6 8.35,3.6 8.35,2.9 ; -10.55,-2.9 -10.55,2.9 10.55,2.9 10.55,-2.9 -10.55,-2.9
Top Courtyard:
  lines w0.05: -0.5,0 0.5,0 ; 0,-0.5 0,0.5 ; -11.25,-3.175 11.25,-3.175 11.25,4.2 -11.25,4.2 -11.25,-3.175
3D body "687134149022.stp": height 2.25, standoff 0, extent -10.55,-2.9 10.55,3.6

## 687134182122 [mm] "ZIF Connectors, Horizontal, Dual Contact Back Locking, pitch 0.5mm, 34p"
height 1.06
pads (36):
  rect 0.3x0.8 smd: 1(-8.25,1.1) 2(-7.75,1.1) 3(-7.25,1.1) 4(-6.75,1.1) 5(-6.25,1.1) 6(-5.75,1.1) 7(-5.25,1.1) 8(-4.75,1.1) 9(-4.25,1.1) 10(-3.75,1.1) 11(-3.25,1.1) 12(-2.75,1.1) 13(-2.25,1.1) 14(-1.75,1.1) 15(-1.25,1.1) 16(-0.75,1.1) 17(-0.25,1.1) 18(0.25,1.1) 19(0.75,1.1) 20(1.25,1.1) 21(1.75,1.1) 22(2.25,1.1) 23(2.75,1.1) 24(3.25,1.1) 25(3.75,1.1) 26(4.25,1.1) 27(4.75,1.1) 28(5.25,1.1) 29(5.75,1.1) 30(6.25,1.1) 31(6.75,1.1) 32(7.25,1.1) 33(7.75,1.1) 34(8.25,1.1)
  rect 0.4x0.8 smd: M1(-9.25,-1.4) M2(9.25,-1.4)
Top Overlay:
  circle w0.15: c-8.3,2.3 r0.075
  lines w0.2: -9.575,-0.7 -9.575,1.05 -8.8,1.05 -8.8,1.425 -9.25,1.425 -9.25,1.925 9.25,1.925 9.25,1.425 8.8,1.425 8.8,1.05 9.575,1.05 9.575,-0.7 ; -8.75,-1.925 8.75,-1.925
Top Designator:
  text ".Designator" at -7.498,-0.5 h1.5
Top Component Outline:
  lines w0.1: -9.5,-1.15 -9.3,-1.15 -9.3,-1.85 9.3,-1.85 9.3,-1.15 9.5,-1.15 9.5,1.05 8.8,1.05 8.8,1.35 9.25,1.35 9.25,1.85 -9.25,1.85 -9.25,1.35 -8.8,1.35 -8.8,1.05 -9.5,1.05 -9.5,-1.15
Top 3D Body:
  lines w0.1: -9.5,-1.15 -9.5,1.05 -8.8,1.05 -8.8,1.35 -9.25,1.35 -9.25,1.85 9.25,1.85 9.25,1.35 8.8,1.35 8.8,1.05 9.5,1.05 9.5,-1.15 9.3,-1.15 9.3,-1.85 -9.3,-1.85 -9.3,-1.15 -9.5,-1.15
Top Courtyard:
  lines w0.05: -0.5,0 0.5,0 ; 0,-0.5 0,0.5 ; -9.775,-2.125 9.775,-2.125 9.775,2.125 -9.775,2.125 -9.775,-2.125
3D body "687134182122.stp": height 0.98, standoff -0.01, extent -9.5,-1.85 9.5,1.85